# Altium footprint library Grant_..PcbLib: 73 footprints (part 1 of 5)
Each footprint in its own frame and in the unit in brackets; x right, y up, seen from the top. Pads: shape width x height; smd on the part's side, far side on the other; paste and mask are expansions set on the pad; w line width, h text height; cw(c..) or ccw(c..) is an arc to the next point about the centre after c.
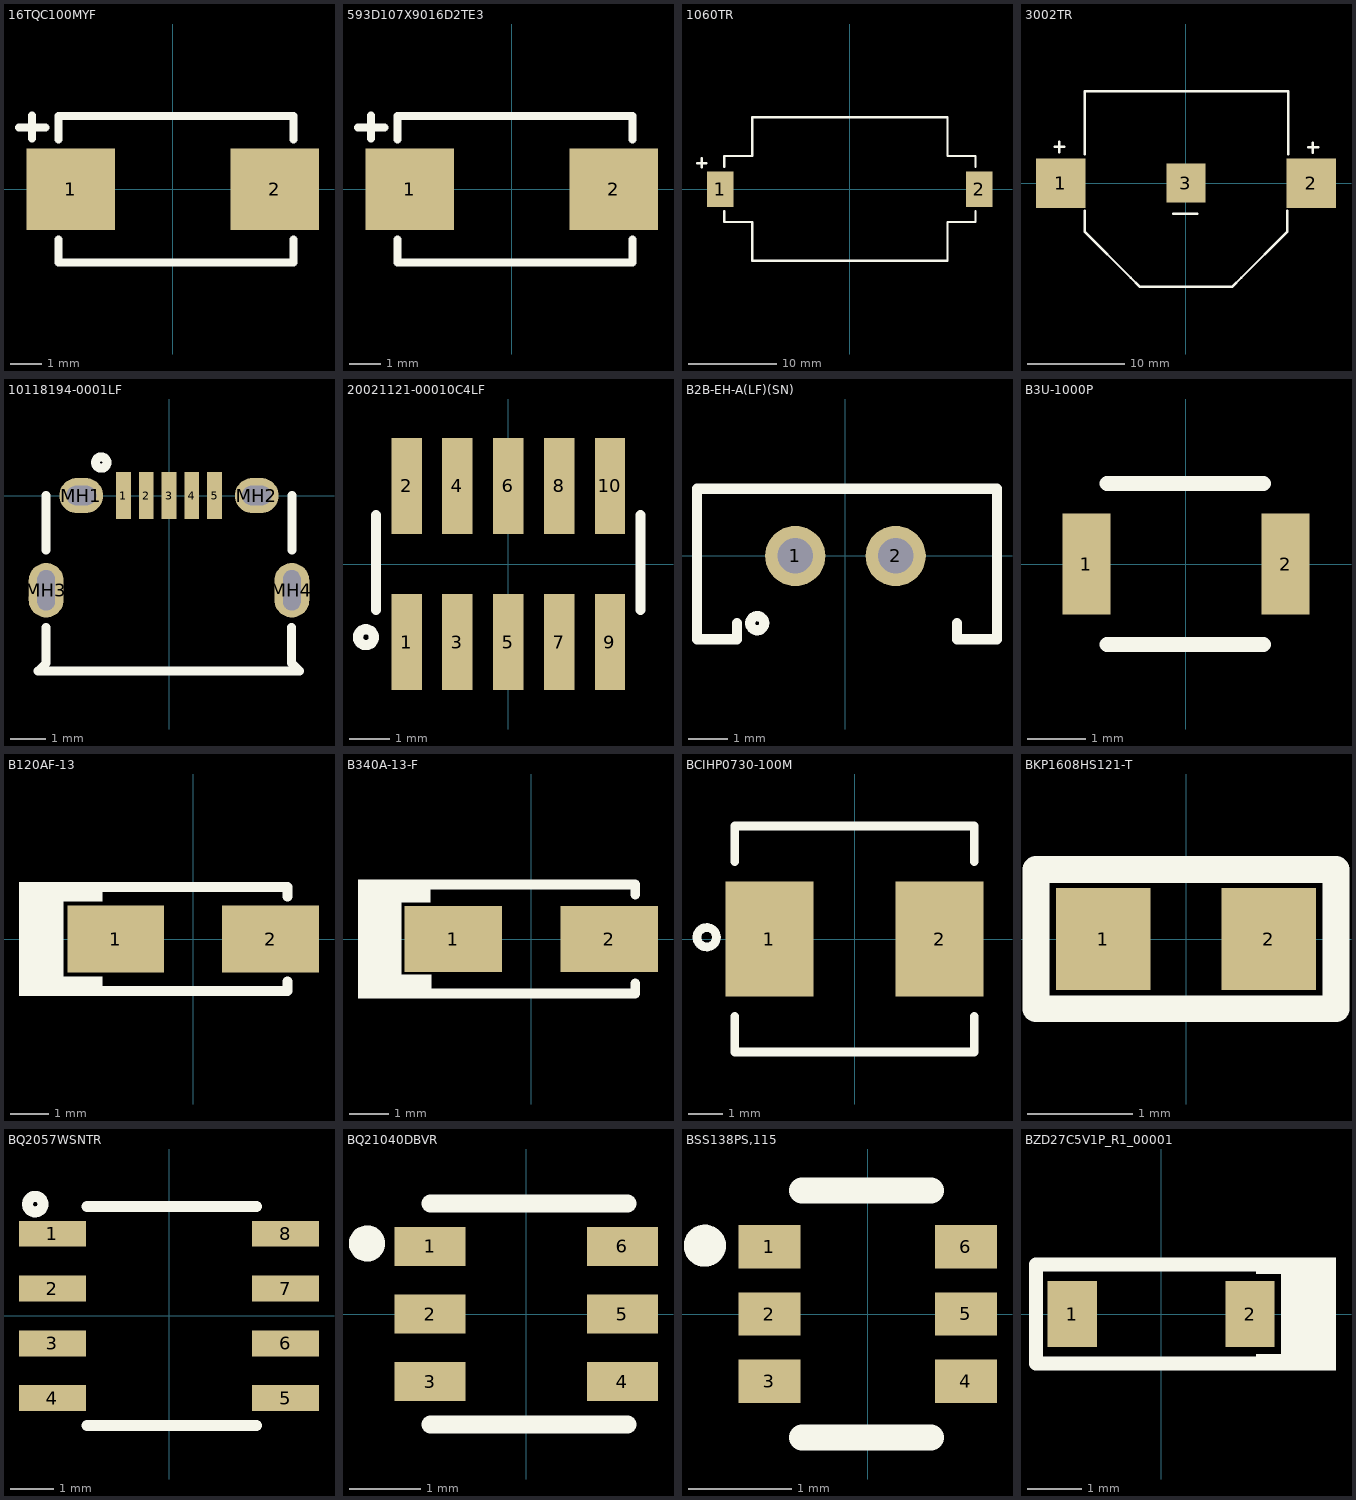
[diagram p0: the footprints below, top view; thin cyan lines are the x and y axes]

## 16TQC100MYF [mm]
pads (2):
  rect 2.79x2.57 smd: 1(-3.22,0) 2(3.22,0)
Top Overlay:
  lines w0.254: -4.851,1.956 -4.013,1.956 ; -4.445,1.6 -4.445,2.337 ; -3.607,-1.575 -3.607,-2.311 3.81,-2.311 3.81,-1.575 ; -3.607,1.575 -3.607,2.311 3.81,2.311 3.81,1.575
3D body "593D D-CASE.stp": height 2.88, standoff -0.04, extent -3.493,-2.207 3.696,2.21

## 593D107X9016D2TE3 [mm]
pads (2):
  rect 2.79x2.57 smd: 1(-3.22,0) 2(3.22,0)
Top Overlay:
  lines w0.254: -4.851,1.956 -4.013,1.956 ; -4.445,1.6 -4.445,2.337 ; -3.607,-1.575 -3.607,-2.311 3.81,-2.311 3.81,-1.575 ; -3.607,1.575 -3.607,2.311 3.81,2.311 3.81,1.575
3D body "593D D-CASE.stp": height 2.88, standoff -0.04, extent -3.493,-2.207 3.696,2.21

## 1060TR [mm]
pads (2):
  rect 3x4 smd: 1(-14.655,0) 2(14.655,0)
Top Overlay:
  lines w0.254: -17.297,2.921 -16.256,2.921 ; -16.764,2.438 -16.764,3.48 ; -14.224,-2.515 -14.224,-3.734 -11.049,-3.734 -11.049,-8.103 11.049,-8.103 11.049,-3.734 14.224,-3.734 14.224,-2.515 ; -14.224,2.515 -14.224,3.734 -11.049,3.734 -11.049,8.128 11.024,8.128 ; 11.049,8.128 11.049,3.734 14.224,3.734 14.224,2.515
3D body "keystone-PN1060TR.STEP": height 5.72, standoff 0.03, extent -15.916,-7.969 15.91,8.033

## 3002TR [mm]
pads (3):
  rect 5.08x5.08 smd: 1(-12.825,0) 2(12.825,0)
  rect 3.96x3.96 smd: 3(0,0)
Top Overlay:
  lines w0.254: -13.462,3.734 -12.446,3.734 ; -12.979,3.175 -12.979,4.216 ; -10.363,-2.845 -10.363,-5.004 -5.664,-9.703 -4.75,-10.617 4.75,-10.617 5.664,-9.703 10.363,-5.004 10.363,-2.845 ; -10.363,2.946 -10.363,9.398 10.465,9.398 10.465,2.946 ; -1.321,-3.15 1.168,-3.15 ; 12.522,3.658 13.538,3.658 ; 13.005,3.099 13.005,4.14
3D body "keystone-PN3002TR.STEP": height 3.95, standoff -0.01, extent -15.405,-10.566 15.354,9.297

## 10118194-0001LF [mm]
pads (9):
  rect 0.42x1.35 smd: 1(-1.3,0) 2(-0.65,0) 3(0,0) 4(0.65,0) 5(1.3,0)
  oval 1.25x1 hole 0.55 slot 0.85 at 0 deg: MH1(-2.5,0) MH2(2.5,0)
  oval 1x1.55 hole 0.5 slot 1.15 at 90 deg: MH3(-3.5,-2.7) MH4(3.5,-2.7)
Top Overlay:
  circle w0.254: c-1.93,0.94 r0.163
  lines w0.254: -3.505,-3.765 -3.505,-4.765 -3.505,-4.775 -3.734,-5.004 3.723,-5.004 3.495,-4.775 ; -3.505,-1.549 -3.505,0 ; 3.495,-4.765 3.495,-3.765 ; 3.505,-1.549 3.505,0
3D body "10118194c.stp": height 2.72, standoff -0.55, extent -4.025,-5.385 4.025,0.195
3D body: height 0.25, standoff 0, extent -7.671,-3.81 -7.671,-3.81

## 20021121-00010C4LF [mm]
pads (10):
  rect 0.76x2.4 smd: 1(-2.54,-1.95) 2(-2.54,1.95) 3(-1.27,-1.95) 4(-1.27,1.95) 5(0,-1.95) 6(0,1.95) 7(1.27,-1.95) 8(1.27,1.95) 9(2.54,-1.95) 10(2.54,1.95)
Top Overlay:
  circle w0.254: c-3.556,-1.829 r0.198
  lines w0.254: -3.302,-1.143 -3.302,1.219 ; 3.302,-1.143 3.302,1.219
3D body "User Library-RM127_10pin_Header.step": height 4.5, standoff 0, extent -3.175,-2.782 3.175,2.718

## B2B-EH-A(LF)(SN) [mil]
pads (2):
  round 60 hole 35.43: 1(-50,0) 2(50,0)
Top Overlay:
  circle w10: c-88,-67 r7.07
  lines w10: -108,-67 -108,-83 -148,-83 -148,67 151,67 151,-83 111,-83 111,-67
3D body "User Library-B2B-EH-A.step": height 244.09, standoff -118.11, extent -147.64,-85.61 147.64,64

## B3U-1000P [mm] "SWITCH TACTILE SPST-NO 0.05A 12V"
pads (2):
  rect 0.82x1.72 smd: 1(-1.7,0) 2(1.7,0)
Top Overlay:
  lines w0.254: -1.346,-1.372 0,-1.372 1.321,-1.372 ; -1.346,1.372 0,1.372 1.321,1.372
3D body "User Library-OMRON B3U1000P.step": height 1.6, standoff 0, extent -2,-1.263 2,1.237

## B120AF-13 [mm]
pads (2):
  rect 2.5x1.72 smd: 1(-2,0) 2(2,0)
Top Overlay:
  rectangle: -4.496,-1.473 -3.353,1.473
  rectangle: -3.404,-1.473 -2.337,-0.965
  rectangle: -3.454,0.965 -2.337,1.473
  lines w0.254: -2.337,-1.346 2.438,-1.346 2.438,-1.092 ; -2.337,1.346 2.438,1.346 2.438,1.092
3D body "User Library-DO-214AD.step": height 1, standoff 0, extent -2.35,-1.25 2.35,1.25

## B340A-13-F [mm]
pads (2):
  rect 2.5x1.7 smd: 1(-2,0) 2(2,0)
Top Overlay:
  rectangle: -3.404,0.94 -2.591,1.524
  rectangle: -3.404,-1.524 -2.565,-0.914
  rectangle: -4.445,-1.524 -3.327,1.524
  lines w0.254: -2.794,-1.397 2.667,-1.397 2.667,-1.143 ; -2.794,1.397 2.667,1.397 2.667,1.143
3D body "User Library-DO-214AC SMA.step": height 2.3, standoff -0.1, extent -2.6,-1.3 2.6,1.3

## BCIHP0730-100M [mm]
pads (2):
  rect 2.575x3.35 smd: 1(-2.487,0) 2(2.488,0)
Top Overlay:
  circle w0.254: c-4.318,0.051 r0.284
  lines w0.254: -3.5,-2.266 -3.5,-3.3 0,-3.3 3.5,-3.3 3.5,-2.266 ; -3.5,2.266 -3.5,3.3 0,3.3 3.5,3.3 3.5,2.266
3D body "bcihp0730_asm.stp": height 3, standoff 0, extent -3.5,-3.3 3.5,3.3

## BKP1608HS121-T [mm]
pads (2):
  rect 0.9x0.97 smd: 1(-0.785,0) 2(0.785,0)
Top Overlay:
  lines w0.254: -1.422,-0.66 -1.422,0.66 1.422,0.66 1.422,-0.66 -1.422,-0.66
3D body "45630.stp": height 0.76, standoff -0.04, extent -0.8,-0.4 0.8,0.4

## BQ2057WSNTR [mm]
pads (8):
  rect 1.55x0.6 smd: 1(-2.7,1.905) 2(-2.7,0.635) 3(-2.7,-0.635) 4(-2.7,-1.905) 5(2.7,-1.905) 6(2.7,-0.635) 7(2.7,0.635) 8(2.7,1.905)
Top Overlay:
  circle w0.254: c-3.099,2.591 r0.18
  lines w0.254: -1.905,-2.54 2.032,-2.54 ; -1.905,2.54 2.032,2.54
3D body "User Library-SOIC-8-1.STEP": height 1.65, standoff -0.1, extent -2.906,-2.413 3.094,2.487

## BQ21040DBVR [mm]
pads (6):
  rect 1x0.55 smd: 1(-1.35,0.95) 2(-1.35,0) 3(-1.35,-0.95) 4(1.35,-0.95) 5(1.35,0) 6(1.35,0.95)
Top Overlay:
  circle w0.254: c-2.235,0.991 r0.127
  lines w0.254: -1.346,-1.549 1.422,-1.549 ; -1.346,1.549 1.422,1.549
3D body "User Library-SOT23-6-2.step": height 1.37, standoff -0.08, extent -1.349,-1.45 1.451,1.45

## BSS138PS,115 [mm]
pads (6):
  rect 0.6x0.42 smd: 1(-0.95,0.65) 2(-0.95,0) 3(-0.95,-0.65) 4(0.95,-0.65) 5(0.95,0) 6(0.95,0.65)
Top Overlay:
  circle w0.254: c-1.575,0.66 r0.076
  lines w0.254: -0.635,-1.194 0.61,-1.194 ; -0.635,1.194 0.61,1.194
3D body "User Library-SOT363-2.step": height 1.09, standoff -0.01, extent -1.2,-1.1 1.2,1.1

## BZD27C5V1P_R1_00001 [mm]
pads (2):
  rect 0.91x1.22 smd: 1(-1.64,0) 2(1.64,0)
Top Overlay:
  region: 2.286,-0.737 1.753,-0.737 1.753,-1.041 2.286,-1.041
  region: 2.286,1.041 1.753,1.041 1.753,0.737 2.286,0.737
  region: 3.226,1.041 2.21,1.041 2.21,-1.041 3.226,-1.041
  lines w0.254: 2.032,0.914 -2.311,0.914 -2.311,-0.914 -1.448,-0.914 2.057,-0.914
3D body "User Library-SOD-123FL.step": height 0.95, standoff 0.01, extent -1.794,-0.825 1.793,0.825